# Altium footprint library PcbLib1.PcbLib: 332 footprints (part 15 of 22)
Each footprint in its own frame and in the unit in brackets; x right, y up, seen from the top. Pads: shape width x height; smd on the part's side, far side on the other; paste and mask are expansions set on the pad; w line width, h text height; cw(c..) or ccw(c..) is an arc to the next point about the centre after c.
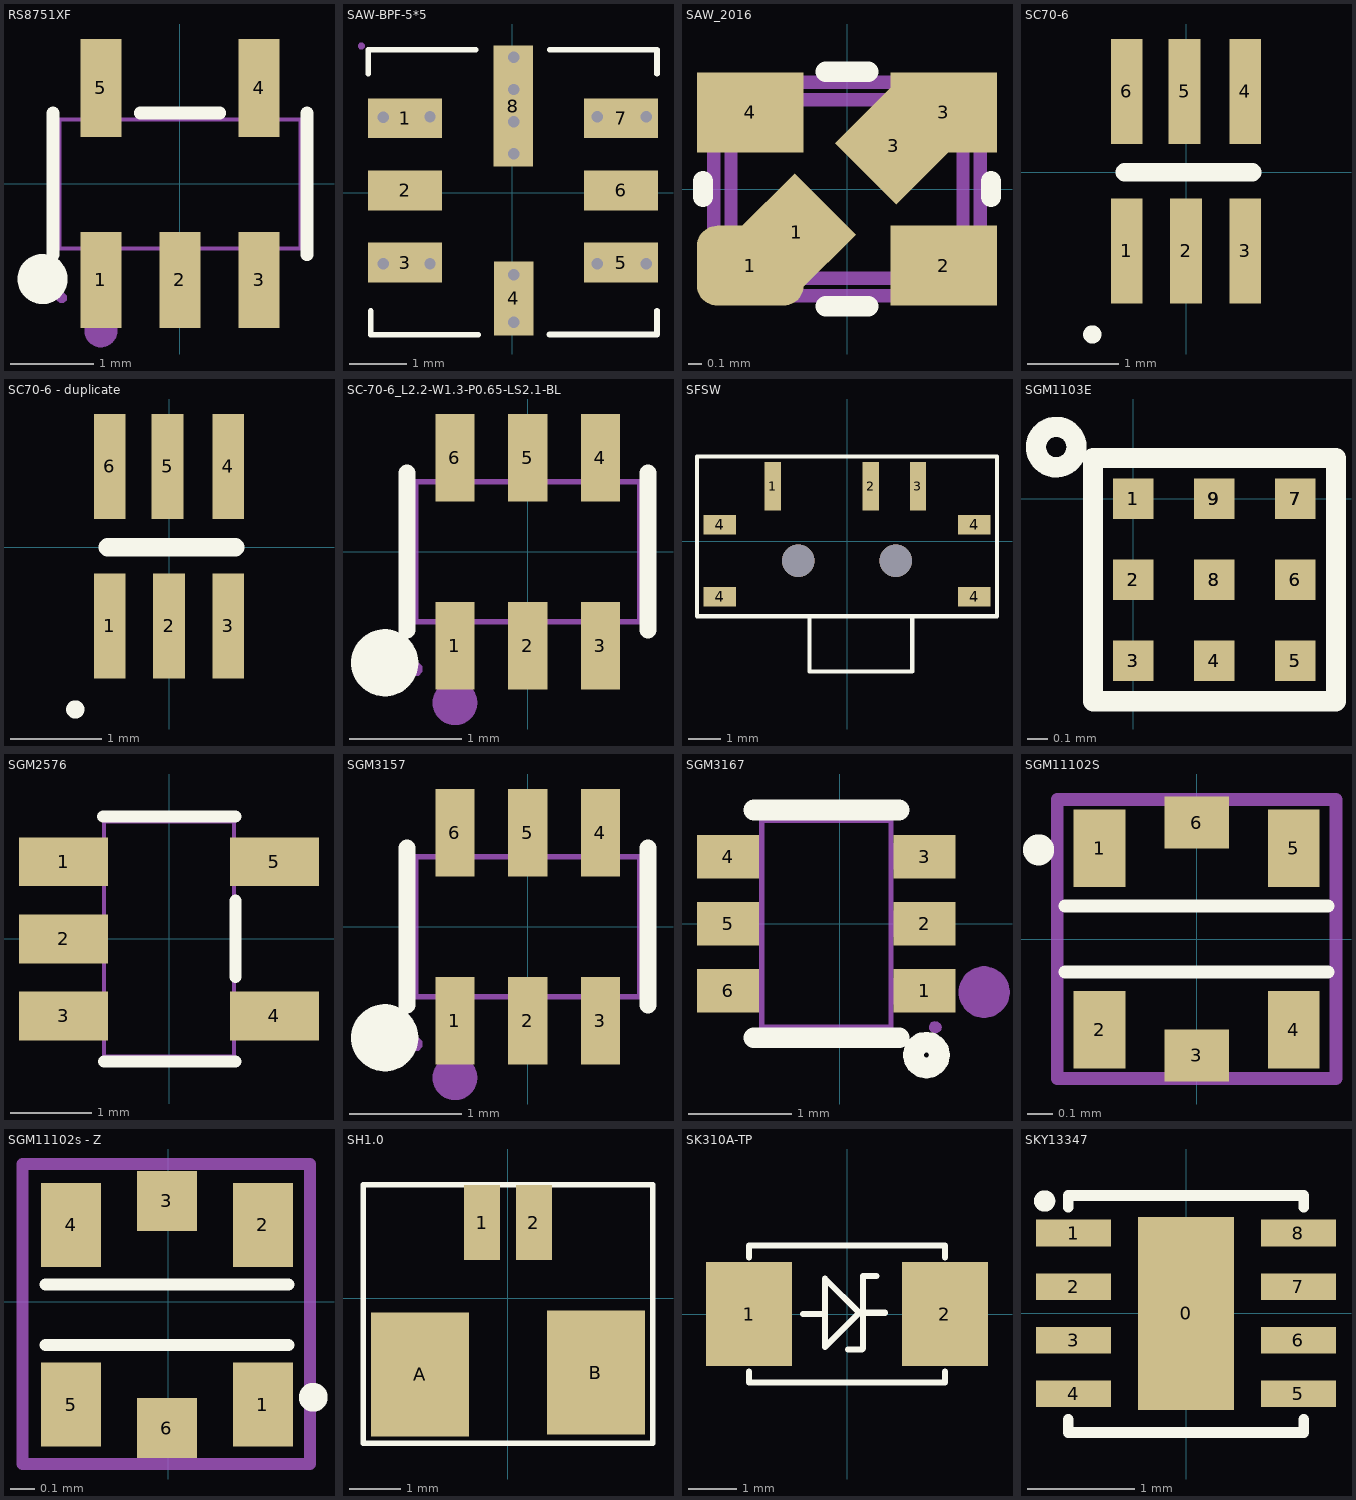
[diagram p14: the footprints below, top view; thin cyan lines are the x and y axes]

## RS8751XF [mm]
pads (5):
  rect 0.49x1.157 smd: 1(-0.95,-1.154) 2(0,-1.154) 3(0.95,-1.154)
  rect 0.49x1.175 smd: 4(0.95,1.154) 5(-0.95,1.154)
Top Overlay:
  circle w0.3: c-1.651,-1.143 r0.15
  lines w0.152: -1.526,-0.851 -1.526,0.851 ; -0.476,0.851 0.476,0.851 ; 1.526,-0.851 1.526,0.851
Mechanical 6:
  circle w0.2: c-0.95,-1.763 r0.1
Mechanical 15:
  region: -1.36,-1.37 -1.36,-1.345 -1.395,-1.31 -1.445,-1.31 -1.48,-1.345 -1.48,-1.37 -1.48,-1.395 -1.445,-1.43 -1.395,-1.43 -1.36,-1.395 -1.36,-1.37
  region: -1.125,0.74 -1.125,1.01 -0.775,1.01 -0.775,0.74
  region: -1.125,1 -1.125,1.4 -0.775,1.4 -0.775,1
  region: 0.775,0.74 0.775,1.01 1.125,1.01 1.125,0.74
  region: 0.775,1 0.775,1.4 1.125,1.4 1.125,1
  region: 0.775,-1.01 0.775,-0.74 1.125,-0.74 1.125,-1.01
  region: 0.775,-1.4 0.775,-1 1.125,-1 1.125,-1.4
  region: -0.175,-1.01 -0.175,-0.74 0.175,-0.74 0.175,-1.01
  region: -0.175,-1.4 -0.175,-1 0.175,-1 0.175,-1.4
  region: -1.125,-1.01 -1.125,-0.74 -0.775,-0.74 -0.775,-1.01
  region: -1.125,-1.4 -1.125,-1 -0.775,-1 -0.775,-1.4
  lines w0.051: -1.45,-0.775 1.45,-0.775 1.45,0.775 -1.45,0.775 -1.45,-0.775

## SAW-BPF-5*5 [mm]
pads (8):
  rect 1.3x0.7 smd mask+0: 1(-1.884,1.309) 2(-1.884,0.039) 3(-1.884,-1.231) 5(1.916,-1.231) 6(1.916,0.039) 7(1.916,1.309)
  rect 0.7x1.3 smd mask+0: 4(0.027,-1.862)
  rect 0.7x2.13 smd mask+0: 8(0.021,1.522)
via 1.499,-1.252 diameter 0.4 hole 0.2
via 2.361,-1.252 diameter 0.4 hole 0.2
via 1.499,1.334 diameter 0.4 hole 0.2
via 2.361,1.334 diameter 0.4 hole 0.2
via -1.444,1.334 diameter 0.4 hole 0.2
via -2.264,-1.252 diameter 0.4 hole 0.2
via -1.444,-1.252 diameter 0.4 hole 0.2
via -2.264,1.323 diameter 0.4 hole 0.2
via 0.026,0.685 diameter 0.4 hole 0.2
via 0.026,1.25 diameter 0.4 hole 0.2
via 0.026,1.814 diameter 0.4 hole 0.2
via 0.026,2.378 diameter 0.4 hole 0.2
via 0.026,-1.445 diameter 0.4 hole 0.2
via 0.026,-2.28 diameter 0.4 hole 0.2
Top Overlay:
  lines w0.1: -2.531,2.093 -2.531,2.512 -0.642,2.512 ; -2.485,-2.083 -2.485,-2.501 -0.597,-2.501 ; 0.659,-2.495 2.548,-2.495 2.548,-2.076 ; 0.66,2.512 2.549,2.512 2.549,2.093
Mechanical 15:
  region: -2.651,2.519 -2.626,2.519 -2.591,2.554 -2.591,2.604 -2.626,2.639 -2.651,2.639 -2.676,2.639 -2.711,2.604 -2.711,2.554 -2.676,2.519 -2.651,2.519

## SAW_2016 [mm]
pads (6):
  rrect50% 0.8x0.6 smd: 1(-0.725,-0.575)
  rect 0.6x0.65 smd rot 45 mask+0.051: 1(-0.375,-0.325) 3(0.35,0.325)
  rect 0.8x0.6 smd: 2(0.725,-0.575) 3(0.725,0.575) 4(-0.725,0.575)
Top Overlay:
  lines w0.152: -1.08,-0.06 -1.08,0.06 ; -0.16,-0.88 0.16,-0.88 ; -0.16,0.88 0.16,0.88 ; 1.08,-0.06 1.08,0.06
Mechanical 7:
  lines w0.1: -1,-0.7 cw(c-1,-0.8) -0.9,-0.8 0.9,-0.8 cw(c1,-0.8) 1,-0.7 1,0.7 cw(c1,0.8) 0.9,0.8 -0.9,0.8 cw(c-1,0.8) -1,0.7 -1,-0.7 ; -0.87,-0.57 ccw(c-0.77,-0.57) -0.77,-0.67 0.77,-0.67 ccw(c0.77,-0.57) 0.87,-0.57 0.87,0.57 ccw(c0.77,0.57) 0.77,0.67 -0.77,0.67 ccw(c-0.77,0.57) -0.87,0.57 -0.87,-0.57
3D body "User Library-GeyerElectronics_KX5.step": height 0.56, standoff 0, extent -1.05,-0.85 1.05,0.85
3D body: height 0.56, standoff 0.15, extent -0.7,-0.65 0.7,0.65

## SC70-6 [mm] "DIP; 24 Leads; Row Spacing 15.24 mm; Pitch 2.54 mm"
height 5.72
pads (6):
  rect 0.35x1.15 smd: 1(-0.652,-0.863) 2(-0.002,-0.863) 3(0.648,-0.863) 4(0.648,0.887) 5(-0.017,0.887) 6(-0.652,0.887)
Top Overlay:
  circle w0.1: c-1.03,-1.779 r0.05
  lines w0.2: -0.675,-0.001 0.725,-0.001

## SC70-6 - duplicate [mm] "DIP; 24 Leads; Row Spacing 15.24 mm; Pitch 2.54 mm"
height 5.72
pads (6):
  rect 0.35x1.15 smd: 1(-0.652,-0.863) 2(-0.002,-0.863) 3(0.648,-0.863) 4(0.648,0.887) 5(-0.017,0.887) 6(-0.652,0.887)
Top Overlay:
  circle w0.1: c-1.03,-1.779 r0.05
  lines w0.2: -0.675,-0.001 0.725,-0.001

## SC-70-6_L2.2-W1.3-P0.65-LS2.1-BL [mm]
pads (6):
  rect 0.35x0.78 smd: 1(-0.65,-0.84) 2(0,-0.84) 3(0.65,-0.84) 4(0.65,0.84) 5(0,0.84) 6(-0.65,0.84)
Top Overlay:
  circle w0.3: c-1.277,-0.992 r0.15
  lines w0.152: -1.076,-0.701 -1.076,0.701 ; 1.076,-0.701 1.076,0.701
Mechanical 6:
  circle w0.2: c-0.65,-1.35 r0.1
Mechanical 15:
  region: -0.775,0.76 -0.525,0.76 -0.525,0.615 -0.775,0.615
  region: -0.775,0.75 -0.525,0.75 -0.525,1.05 -0.775,1.05
  region: -0.125,0.76 0.125,0.76 0.125,0.615 -0.125,0.615
  region: -0.125,0.75 0.125,0.75 0.125,1.05 -0.125,1.05
  region: 0.525,0.76 0.775,0.76 0.775,0.615 0.525,0.615
  region: 0.525,0.75 0.775,0.75 0.775,1.05 0.525,1.05
  region: 0.525,-0.615 0.775,-0.615 0.775,-0.76 0.525,-0.76
  region: 0.525,-0.75 0.775,-0.75 0.775,-1.05 0.525,-1.05
  region: -0.125,-0.615 0.125,-0.615 0.125,-0.76 -0.125,-0.76
  region: -0.125,-0.75 0.125,-0.75 0.125,-1.05 -0.125,-1.05
  region: -0.775,-0.615 -0.525,-0.615 -0.525,-0.76 -0.775,-0.76
  region: -0.775,-0.75 -0.525,-0.75 -0.525,-1.05 -0.775,-1.05
  region: -0.94,-1.05 -0.94,-1.025 -0.975,-0.99 -1.025,-0.99 -1.06,-1.025 -1.06,-1.05 -1.06,-1.075 -1.025,-1.11 -0.975,-1.11 -0.94,-1.075 -0.94,-1.05
  lines w0.051: -1,-0.625 -1,0.625 1,0.625 1,-0.625 -1,-0.625

## SFSW [mm]
height 8.1
pads (7):
  rect 0.5x1.5 smd: 1(-2.275,1.693) 2(0.725,1.693) 3(2.175,1.693)
  rect 1x0.6 smd: 4(-3.9,-1.693) 4(-3.9,0.507) 4(3.9,0.507) 4(3.9,-1.693)
via -1.5,-0.593 diameter 1 hole 1
via 1.5,-0.593 diameter 1 hole 1
Top Overlay:
  lines w0.127: -1.154,-2.371 -1.154,-3.987 2,-3.987 2,-2.371 ; -4.6,-2.293 4.6,-2.293 4.6,2.607 -4.6,2.607 -4.6,-2.293

## SGM1103E [mm]
pads (18):
  rect 0.2x0.2 smd mask+0.102: 1(0,0) 2(0,-0.4) 3(0,-0.8) 4(0.4,-0.8) 5(0.8,-0.8) 6(0.8,-0.4) 7(0.8,0) 8(0.4,-0.4) 9(0.4,0)
  rect 0.3x0.3 on Top Solder mask+0.102: 1(0,0) 2(0,-0.4) 3(0,-0.8) 4(0.4,-0.8) 5(0.8,-0.8) 6(0.8,-0.4) 7(0.802,-0.002) 8(0.4,-0.4) 9(0.397,-0.001)
Top Overlay:
  circle w0.1: c-0.381,0.254 r0.1
  lines w0.1: -0.2,-1 -0.2,0.2 1,0.2 1,-1 -0.2,-1

## SGM2576 [mm] "功率开关"
pads (5):
  rect 1.1x0.6 smd paste+0 mask+0.05: 1(-1.3,0.95) 2(-1.3,0) 3(-1.3,-0.95) 4(1.3,-0.95) 5(1.3,0.95)
Top Overlay:
  lines w0.15: -0.811,1.508 0.819,1.508 ; -0.8,-1.51 0.82,-1.51 ; 0.819,-0.471 0.819,0.471
Mechanical 6:
  lines w0.051: -0.8,-1.45 0.8,-1.45 0.8,1.45 -0.8,1.45 -0.8,-1.45
Mechanical 7:
  region: -0.96,0.2 -0.79,0.2 -0.79,-0.2 -0.96,-0.2
  region: -0.96,-0.75 -0.79,-0.75 -0.79,-1.15 -0.96,-1.15
  region: -0.96,1.15 -0.79,1.15 -0.79,0.75 -0.96,0.75
  region: 0.79,-0.75 0.96,-0.75 0.96,-1.15 0.79,-1.15
  region: 0.79,1.15 0.96,1.15 0.96,0.75 0.79,0.75
Mechanical 9:
  region: -1.4,0.2 -0.95,0.2 -0.95,-0.2 -1.4,-0.2
  region: -1.4,-0.75 -0.95,-0.75 -0.95,-1.15 -1.4,-1.15
  region: -1.4,1.15 -0.95,1.15 -0.95,0.75 -1.4,0.75
  region: 0.95,-0.75 1.4,-0.75 1.4,-1.15 0.95,-1.15
  region: 0.95,1.15 1.4,1.15 1.4,0.75 0.95,0.75

## SGM3157 [mm]
pads (6):
  rect 0.35x0.78 smd: 1(-0.65,-0.84) 2(0,-0.84) 3(0.65,-0.84) 4(0.65,0.84) 5(0,0.84) 6(-0.65,0.84)
Top Overlay:
  circle w0.3: c-1.277,-0.992 r0.15
  lines w0.152: -1.076,-0.701 -1.076,0.701 ; 1.076,-0.701 1.076,0.701
Mechanical 6:
  circle w0.2: c-0.65,-1.35 r0.1
Mechanical 15:
  region: -0.775,0.76 -0.525,0.76 -0.525,0.615 -0.775,0.615
  region: -0.775,0.75 -0.525,0.75 -0.525,1.05 -0.775,1.05
  region: -0.125,0.76 0.125,0.76 0.125,0.615 -0.125,0.615
  region: -0.125,0.75 0.125,0.75 0.125,1.05 -0.125,1.05
  region: 0.525,0.76 0.775,0.76 0.775,0.615 0.525,0.615
  region: 0.525,0.75 0.775,0.75 0.775,1.05 0.525,1.05
  region: 0.525,-0.615 0.775,-0.615 0.775,-0.76 0.525,-0.76
  region: 0.525,-0.75 0.775,-0.75 0.775,-1.05 0.525,-1.05
  region: -0.125,-0.615 0.125,-0.615 0.125,-0.76 -0.125,-0.76
  region: -0.125,-0.75 0.125,-0.75 0.125,-1.05 -0.125,-1.05
  region: -0.775,-0.615 -0.525,-0.615 -0.525,-0.76 -0.775,-0.76
  region: -0.775,-0.75 -0.525,-0.75 -0.525,-1.05 -0.775,-1.05
  region: -0.94,-1.05 -0.94,-1.025 -0.975,-0.99 -1.025,-0.99 -1.06,-1.025 -1.06,-1.05 -1.06,-1.075 -1.025,-1.11 -0.975,-1.11 -0.94,-1.075 -0.94,-1.05
  lines w0.051: -1,-0.625 -1,0.625 1,0.625 1,-0.625 -1,-0.625

## SGM3167 [mil] "SGM3167"
pads (6):
  rect 23.6x16.5 smd: 1(32.4,-25.5) 2(32.4,0) 3(32.4,25.6) 4(-42.4,25.6) 5(-42.4,0) 6(-42.4,-25.5)
Top Overlay:
  lines w7.9: -32.5,-43.3 22.6,-43.3 ; -32.5,43.3 22.6,43.3 ; 33,-45 31.1,-45.3 29.6,-46.4 28.5,-48 28.1,-49.9 28.5,-51.8 29.6,-53.4 31.2,-54.4 33.1,-54.8 34.9,-54.4 36.5,-53.4 37.6,-51.8 38,-49.9 37.6,-48 36.6,-46.4 35,-45.3 33.1,-45
Mechanical 6:
  lines w2: -29.6,-39.3 -29.6,39.4 19.6,39.4 19.6,-39.3 -29.6,-39.3
  lines w9.8: 50.1,-26 50.5,-24.1 51.5,-22.5 53.1,-21.4 55,-21 56.9,-21.4 58.5,-22.5 59.6,-24.1 59.9,-26 59.6,-27.8 58.5,-29.4 56.9,-30.5 55,-30.9 53.1,-30.5 51.5,-29.4 50.5,-27.8 50.1,-26
Mechanical 7:
  region: 19.4,20.7 19.4,30.6 25.1,30.6 25.1,20.7
  region: 19.4,-4.9 19.4,5 25.1,5 25.1,-4.9
  region: 19.4,-30.5 19.4,-20.6 25.1,-20.6 25.1,-30.5
  region: -29.2,-20.6 -29.2,-30.5 -34.9,-30.5 -34.9,-20.6
  region: -29.2,5 -29.2,-4.9 -34.9,-4.9 -34.9,5
  region: -29.2,30.6 -29.2,20.7 -34.9,20.7 -34.9,30.6
Mechanical 8:
  region: 38.8,-39.3 38.5,-40.6 37.4,-41.5 36.1,-41.7 34.9,-41.1 34.2,-40 34.2,-38.7 34.9,-37.5 36.1,-37 37.4,-37.2 38.5,-38.1
Mechanical 9:
  region: 24.7,20.7 24.7,30.6 36.5,30.6 36.5,20.7
  region: 24.7,-4.9 24.7,5 36.5,5 36.5,-4.9
  region: 24.7,-30.5 24.7,-20.6 36.5,-20.6 36.5,-30.5
  region: -34.6,-20.6 -34.6,-30.5 -46.4,-30.5 -46.4,-20.6
  region: -34.6,5 -34.6,-4.9 -46.4,-4.9 -46.4,5
  region: -34.6,30.6 -34.6,20.7 -46.4,20.7 -46.4,30.6

## SGM11102S [mm]
pads (6):
  rect 0.2x0.3 smd mask+0.051: 1(-0.375,0.35) 2(-0.375,-0.35) 4(0.375,-0.35) 5(0.375,0.35)
  rect 0.25x0.2 smd mask+0.051: 3(0,-0.45) 6(0,0.45)
Top Overlay:
  circle w0.1: c-0.611,0.345 r0.01
  lines w0.05: -0.508,-0.127 0.508,-0.127 ; -0.508,0.127 0.508,0.127
Mechanical 15:
  lines w0.05: -0.539,-0.539 0.539,-0.539 0.539,0.539 -0.539,0.539 -0.539,-0.539

## SGM11102s - Z [mm]
pads (6):
  rect 0.25x0.35 smd mask+0.051: 1(0.394,-0.429) 2(0.394,0.321) 4(-0.406,0.321) 5(-0.406,-0.429)
  rect 0.25x0.25 smd mask+0.051: 3(-0.006,0.421) 6(-0.006,-0.527)
Top Overlay:
  circle w0.1: c0.605,-0.399 r0.01
  lines w0.05: -0.514,-0.181 0.502,-0.181 ; -0.514,0.073 0.502,0.073
Mechanical 15:
  lines w0.05: -0.61,-0.677 -0.61,0.575 0.591,0.575 0.591,-0.677 -0.61,-0.677

## SH1.0 [mm]
pads (4):
  rect 0.7x1.45 smd: 1(-0.5,1.468) 2(0.5,1.468)
  rect 1.9x2.4 smd: A(-1.7,-1.467) B(1.7,-1.432)
Top Overlay:
  lines w0.1: -2.8,-2.8 2.8,-2.8 2.8,2.2 -2.8,2.2 -2.8,-2.8

## SK310A-TP [mil] "稳压二极管"
pads (2):
  rect 70x85 smd: 1(-80,0) 2(80,0)
Top Overlay:
  lines w5: -80,-47 -80,-56 80,-56 80,-47 ; -80,46 -80,56 80,56 80,46 ; -36,0 -18,0 ; 1,-29 12,-29 13,-28 13,31 24,31 ; 31,1 10,1 ; 10,1 -18,-27 -18,29 10,1

## SKY13347 [mm]
height 0.15
pads (9):
  rect 0.9x1.8 smd: 0(0,0)
  rect 0.7x0.25 smd: 1(-1.05,0.75) 2(-1.05,0.25) 3(-1.05,-0.25) 4(-1.05,-0.75) 5(1.05,-0.75) 6(1.05,-0.25) 7(1.05,0.25) 8(1.05,0.75)
Top Overlay:
  circle w0.1: c-1.32,1.05 r0.05
  lines w0.1: -1.1,-0.99 -1.1,-1.11 1.1,-1.11 1.1,-0.99 ; -1.1,0.99 -1.1,1.1 1.1,1.1 1.1,0.99